# Altium schematic symbol library ADM3055EBRIZ-RL.SchLib: 1 symbol
Pins are listed as number, name and electrical type; pins without a type are passive.

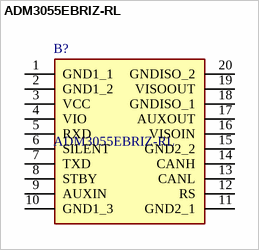
[diagram p0: symbol ADM3055EBRIZ-RL]

## ADM3055EBRIZ-RL
designator B?
CAN Interface IC 5kV isoPower Isolated CAN-FD Transceiver; Manufacturer_Name: Analog Devices; Geometry.Height: 2.64mm; Mouser Part Number: 584-ADM3055EBRIZ-RL; Mouser Price/Stock: https://www.mouser.co.uk/ProductDetail/Analog-Devices/ADM3055EBRIZ-RL?qs=qSfuJ%252Bfl%2Fd7r0f9T4vdNWQ%3D%3D; Manufacturer_Part_Number: ADM3055EBRIZ-RL; Datasheet Link: https://www.analog.com/media/en/technical-documentation/data-sheets/ADM3055E-3057E.pdf
footprint SOIC127P1030X264-20N
pins: 1 GND1_1, 2 GND1_2, 3 VCC, 4 VIO, 5 RXD, 6 SILENT, 7 TXD, 8 STBY, 9 AUXIN, 10 GND1_3, 11 GND2_1, 12 RS, 13 CANL, 14 CANH, 15 GND2_2, 16 VISOIN, 17 AUXOUT, 18 GNDISO_1, 19 VISOOUT, 20 GNDISO_2